# EAGLE library part TP4056 (library C3_SCOUT_REVC)
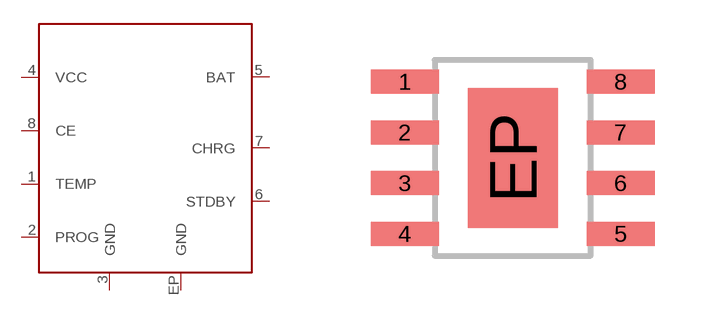
[diagram p0: symbol with the pads of ESOP8-EP; footprint ESOP8-EP]

Designator prefix U

## TP4056  [ESOP8-EP]
1  TEMP  in
2  PROG  pas
3  GND  pwr
4  VCC  pwr
5  BAT  pas
6  STDBY  oc
7  CHRG  oc
8  CE  in
EP  GND  pwr

## Footprint ESOP8-EP (pad centres in mm)
smd 1.7 x 0.6: 1 -2.7,1.905; 2 -2.7,0.635; 3 -2.7,-0.635; 4 -2.7,-1.905; 5 2.7,-1.905; 6 2.7,-0.635; 7 2.7,0.635; 8 2.7,1.905
smd 2.25 x 3.5: EP 0,0